# Altium footprint library WR-PHD_Socket Header.PcbLib: 279 footprints (part 18 of 18)
Each footprint in its own frame and in the unit in brackets; x right, y up, seen from the top. Pads: shape width x height; smd on the part's side, far side on the other; paste and mask are expansions set on the pad; w line width, h text height; cw(c..) or ccw(c..) is an arc to the next point about the centre after c.
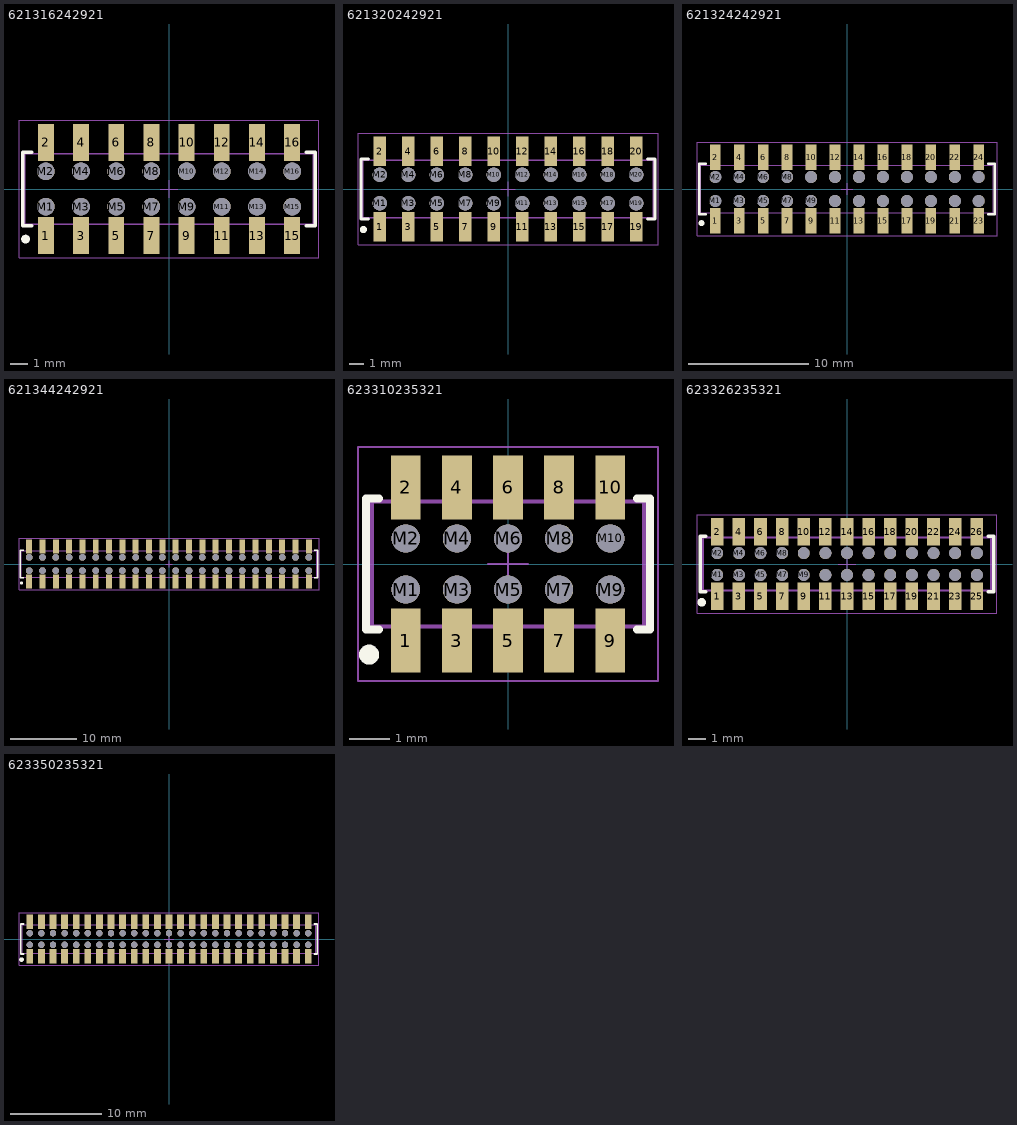
[diagram p17: the footprints below, top view; thin cyan lines are the x and y axes]

## 621316242921 [mm] "Socket Header, Pitch 2.00 mm, SMT, Vertical, dual row, 16p"
height 4.85
pads (32):
  rect 0.9x2.1 smd: 1(-7,-2.65) 2(-7,2.65) 3(-5,-2.65) 4(-5,2.65) 5(-3,-2.65) 6(-3,2.65) 7(-1,-2.65) 8(-1,2.65) 9(1,-2.65) 10(1,2.65) 11(3,-2.65) 12(3,2.65) 13(5,-2.65) 14(5,2.65) 15(7,-2.65) 16(7,2.65)
  round 1 hole 1 unplated: M1(-7,-1) M2(-7,1) M3(-5,-1) M4(-5,1) M5(-3,-1) M6(-3,1) M7(-1,-1) M8(-1,1) M9(1,-1) M10(1,1) M11(3,-1) M12(3,1) M13(5,-1) M14(5,1) M15(7,-1) M16(7,1)
Top Overlay:
  circle w0.25: c-8.15,-2.85 r0.125
  lines w0.2: -7.8,-2.1 -8.325,-2.1 -8.325,2.1 -7.8,2.1 ; 7.8,-2.1 8.325,-2.1 8.325,2.1 7.8,2.1
Top Designator:
  text ".Designator" at -7.498,-0.5 h1.5
Top Component Outline:
  lines w0.1: -7.25,-2 -7.25,-3.1 -6.75,-3.1 -6.75,-2 ; -7.25,2 -7.25,3.1 -6.75,3.1 -6.75,2 ; -5.25,-2 -5.25,-3.1 -4.75,-3.1 -4.75,-2 ; -5.25,2 -5.25,3.1 -4.75,3.1 -4.75,2 ; -3.25,-2 -3.25,-3.1 -2.75,-3.1 -2.75,-2 ; -3.25,2 -3.25,3.1 -2.75,3.1 -2.75,2 ; -1.25,-2 -1.25,-3.1 -0.75,-3.1 -0.75,-2 ; -1.25,2 -1.25,3.1 -0.75,3.1 -0.75,2 ; 0.75,-2 0.75,-3.1 1.25,-3.1 1.25,-2 ; 0.75,2 0.75,3.1 1.25,3.1 1.25,2 ; 2.75,-2 2.75,-3.1 3.25,-3.1 3.25,-2 ; 2.75,2 2.75,3.1 3.25,3.1 3.25,2 ; 4.75,-2 4.75,-3.1 5.25,-3.1 5.25,-2 ; 4.75,2 4.75,3.1 5.25,3.1 5.25,2 ; 6.75,-2 6.75,-3.1 7.25,-3.1 7.25,-2 ; 6.75,2 6.75,3.1 7.25,3.1 7.25,2 ; -8.2,-2 8.2,-2 8.2,2 -8.2,2 -8.2,-2
Top Courtyard:
  lines w0.05: -8.525,-3.9 -8.525,3.9 8.525,3.9 8.525,-3.9 -8.525,-3.9
Top Component Center:
  lines w0.05: -0.5,0 0.5,0 ; 0,-0.5 0,0.5
3D body "621316242921.stp": height 4.6, standoff 0, extent -8.25,-3.1 8.25,3.1

## 621320242921 [mm] "Socket Header, Pitch 2.00 mm, SMT, Vertical, dual row, 20p"
height 4.85
pads (40):
  rect 0.9x2.1 smd: 1(-9,-2.65) 2(-9,2.65) 3(-7,-2.65) 4(-7,2.65) 5(-5,-2.65) 6(-5,2.65) 7(-3,-2.65) 8(-3,2.65) 9(-1,-2.65) 10(-1,2.65) 11(1,-2.65) 12(1,2.65) 13(3,-2.65) 14(3,2.65) 15(5,-2.65) 16(5,2.65) 17(7,-2.65) 18(7,2.65) 19(9,-2.65) 20(9,2.65)
  round 1 hole 1 unplated: M1(-9,-1) M2(-9,1) M3(-7,-1) M4(-7,1) M5(-5,-1) M6(-5,1) M7(-3,-1) M8(-3,1) M9(-1,-1) M10(-1,1) M11(1,-1) M12(1,1) M13(3,-1) M14(3,1) M15(5,-1) M16(5,1) M17(7,-1) M18(7,1) M19(9,-1) M20(9,1)
Top Overlay:
  circle w0.25: c-10.15,-2.85 r0.125
  lines w0.2: -9.8,-2.1 -10.325,-2.1 -10.325,2.1 -9.8,2.1 ; 9.8,-2.1 10.325,-2.1 10.325,2.1 9.8,2.1
Top Designator:
  text ".Designator" at -7.498,-0.5 h1.5
Top Component Outline:
  lines w0.1: -9.25,-2 -9.25,-3.1 -8.75,-3.1 -8.75,-2 ; -9.25,2 -9.25,3.1 -8.75,3.1 -8.75,2 ; -7.25,-2 -7.25,-3.1 -6.75,-3.1 -6.75,-2 ; -7.25,2 -7.25,3.1 -6.75,3.1 -6.75,2 ; -5.25,-2 -5.25,-3.1 -4.75,-3.1 -4.75,-2 ; -5.25,2 -5.25,3.1 -4.75,3.1 -4.75,2 ; -3.25,-2 -3.25,-3.1 -2.75,-3.1 -2.75,-2 ; -3.25,2 -3.25,3.1 -2.75,3.1 -2.75,2 ; -1.25,-2 -1.25,-3.1 -0.75,-3.1 -0.75,-2 ; -1.25,2 -1.25,3.1 -0.75,3.1 -0.75,2 ; 0.75,-2 0.75,-3.1 1.25,-3.1 1.25,-2 ; 0.75,2 0.75,3.1 1.25,3.1 1.25,2 ; 2.75,-2 2.75,-3.1 3.25,-3.1 3.25,-2 ; 2.75,2 2.75,3.1 3.25,3.1 3.25,2 ; 4.75,-2 4.75,-3.1 5.25,-3.1 5.25,-2 ; 4.75,2 4.75,3.1 5.25,3.1 5.25,2 ; 6.75,-2 6.75,-3.1 7.25,-3.1 7.25,-2 ; 6.75,2 6.75,3.1 7.25,3.1 7.25,2 ; 8.75,-2 8.75,-3.1 9.25,-3.1 9.25,-2 ; 8.75,2 8.75,3.1 9.25,3.1 9.25,2 ; -10.2,-2 10.2,-2 10.2,2 -10.2,2 -10.2,-2
Top Courtyard:
  lines w0.05: -10.525,-3.9 -10.525,3.9 10.525,3.9 10.525,-3.9 -10.525,-3.9
Top Component Center:
  lines w0.05: -0.5,0 0.5,0 ; 0,-0.5 0,0.5
3D body "621320242921.stp": height 4.6, standoff 0, extent -10.25,-3.1 10.25,3.1

## 621324242921 [mm] "Socket Header, Pitch 2.00 mm, SMT, Vertical, dual row, 24p"
height 4.85
pads (48):
  rect 0.9x2.1 smd: 1(-11,-2.65) 2(-11,2.65) 3(-9,-2.65) 4(-9,2.65) 5(-7,-2.65) 6(-7,2.65) 7(-5,-2.65) 8(-5,2.65) 9(-3,-2.65) 10(-3,2.65) 11(-1,-2.65) 12(-1,2.65) 13(1,-2.65) 14(1,2.65) 15(3,-2.65) 16(3,2.65) 17(5,-2.65) 18(5,2.65) 19(7,-2.65) 20(7,2.65) 21(9,-2.65) 22(9,2.65) 23(11,-2.65) 24(11,2.65)
  round 1 hole 1 unplated: M1(-11,-1) M2(-11,1) M3(-9,-1) M4(-9,1) M5(-7,-1) M6(-7,1) M7(-5,-1) M8(-5,1) M9(-3,-1) M10(-3,1) M11(-1,-1) M12(-1,1) M13(1,-1) M14(1,1) M15(3,-1) M16(3,1) M17(5,-1) M18(5,1) M19(7,-1) M20(7,1) M21(9,-1) M22(9,1) M23(11,-1) M24(11,1)
Top Overlay:
  circle w0.25: c-12.15,-2.85 r0.125
  lines w0.2: -11.8,-2.1 -12.325,-2.1 -12.325,2.1 -11.8,2.1 ; 11.8,-2.1 12.325,-2.1 12.325,2.1 11.8,2.1
Top Designator:
  text ".Designator" at -7.498,-0.5 h1.5
Top Component Outline:
  lines w0.1: -11.25,-2 -11.25,-3.1 -10.75,-3.1 -10.75,-2 ; -11.25,2 -11.25,3.1 -10.75,3.1 -10.75,2 ; -9.25,-2 -9.25,-3.1 -8.75,-3.1 -8.75,-2 ; -9.25,2 -9.25,3.1 -8.75,3.1 -8.75,2 ; -7.25,-2 -7.25,-3.1 -6.75,-3.1 -6.75,-2 ; -7.25,2 -7.25,3.1 -6.75,3.1 -6.75,2 ; -5.25,-2 -5.25,-3.1 -4.75,-3.1 -4.75,-2 ; -5.25,2 -5.25,3.1 -4.75,3.1 -4.75,2 ; -3.25,-2 -3.25,-3.1 -2.75,-3.1 -2.75,-2 ; -3.25,2 -3.25,3.1 -2.75,3.1 -2.75,2 ; -1.25,-2 -1.25,-3.1 -0.75,-3.1 -0.75,-2 ; -1.25,2 -1.25,3.1 -0.75,3.1 -0.75,2 ; 0.75,-2 0.75,-3.1 1.25,-3.1 1.25,-2 ; 0.75,2 0.75,3.1 1.25,3.1 1.25,2 ; 2.75,-2 2.75,-3.1 3.25,-3.1 3.25,-2 ; 2.75,2 2.75,3.1 3.25,3.1 3.25,2 ; 4.75,-2 4.75,-3.1 5.25,-3.1 5.25,-2 ; 4.75,2 4.75,3.1 5.25,3.1 5.25,2 ; 6.75,-2 6.75,-3.1 7.25,-3.1 7.25,-2 ; 6.75,2 6.75,3.1 7.25,3.1 7.25,2 ; 8.75,-2 8.75,-3.1 9.25,-3.1 9.25,-2 ; 8.75,2 8.75,3.1 9.25,3.1 9.25,2 ; 10.75,-2 10.75,-3.1 11.25,-3.1 11.25,-2 ; 10.75,2 10.75,3.1 11.25,3.1 11.25,2 ; -12.2,-2 12.2,-2 12.2,2 -12.2,2 -12.2,-2
Top Courtyard:
  lines w0.05: -12.525,-3.9 -12.525,3.9 12.525,3.9 12.525,-3.9 -12.525,-3.9
Top Component Center:
  lines w0.05: -0.5,0 0.5,0 ; 0,-0.5 0,0.5
3D body "621324242921.stp": height 4.6, standoff 0, extent -12.25,-3.1 12.25,3.1

## 621344242921 [mm] "Socket Header, Pitch 2.00 mm, SMT, Vertical, dual row, 44p"
height 4.85
pads (88):
  rect 0.9x2.1 smd: 1(-21,-2.65) 2(-21,2.65) 3(-19,-2.65) 4(-19,2.65) 5(-17,-2.65) 6(-17,2.65) 7(-15,-2.65) 8(-15,2.65) 9(-13,-2.65) 10(-13,2.65) 11(-11,-2.65) 12(-11,2.65) 13(-9,-2.65) 14(-9,2.65) 15(-7,-2.65) 16(-7,2.65) 17(-5,-2.65) 18(-5,2.65) 19(-3,-2.65) 20(-3,2.65) 21(-1,-2.65) 22(-1,2.65) 23(1,-2.65) 24(1,2.65) 25(3,-2.65) 26(3,2.65) 27(5,-2.65) 28(5,2.65) 29(7,-2.65) 30(7,2.65) 31(9,-2.65) 32(9,2.65) 33(11,-2.65) 34(11,2.65) 35(13,-2.65) 36(13,2.65) 37(15,-2.65) 38(15,2.65) 39(17,-2.65) 40(17,2.65) 41(19,-2.65) 42(19,2.65) 43(21,-2.65) 44(21,2.65)
  round 1 hole 1 unplated: M1(-21,-1) M2(-21,1) M3(-19,-1) M4(-19,1) M5(-17,-1) M6(-17,1) M7(-15,-1) M8(-15,1) M9(-13,-1) M10(-13,1) M11(-11,-1) M12(-11,1) M13(-9,-1) M14(-9,1) M15(-7,-1) M16(-7,1) M17(-5,-1) M18(-5,1) M19(-3,-1) M20(-3,1) M21(-1,-1) M22(-1,1) M23(1,-1) M24(1,1) M25(3,-1) M26(3,1) M27(5,-1) M28(5,1) M29(7,-1) M30(7,1) M31(9,-1) M32(9,1) M33(11,-1) M34(11,1) M35(13,-1) M36(13,1) M37(15,-1) M38(15,1) M39(17,-1) M40(17,1) M41(19,-1) M42(19,1) M43(21,-1) M44(21,1)
Top Overlay:
  circle w0.25: c-22.15,-2.85 r0.125
  lines w0.2: -21.8,-2.1 -22.325,-2.1 -22.325,2.1 -21.8,2.1 ; 21.8,-2.1 22.325,-2.1 22.325,2.1 21.8,2.1
Top Designator:
  text ".Designator" at -7.498,-0.5 h1.5
Top Component Outline:
  lines w0.1: -21.25,-2 -21.25,-3.1 -20.75,-3.1 -20.75,-2 ; -21.25,2 -21.25,3.1 -20.75,3.1 -20.75,2 ; -19.25,-2 -19.25,-3.1 -18.75,-3.1 -18.75,-2 ; -19.25,2 -19.25,3.1 -18.75,3.1 -18.75,2 ; -17.25,-2 -17.25,-3.1 -16.75,-3.1 -16.75,-2 ; -17.25,2 -17.25,3.1 -16.75,3.1 -16.75,2 ; -15.25,-2 -15.25,-3.1 -14.75,-3.1 -14.75,-2 ; -15.25,2 -15.25,3.1 -14.75,3.1 -14.75,2 ; -13.25,-2 -13.25,-3.1 -12.75,-3.1 -12.75,-2 ; -13.25,2 -13.25,3.1 -12.75,3.1 -12.75,2 ; -11.25,-2 -11.25,-3.1 -10.75,-3.1 -10.75,-2 ; -11.25,2 -11.25,3.1 -10.75,3.1 -10.75,2 ; -9.25,-2 -9.25,-3.1 -8.75,-3.1 -8.75,-2 ; -9.25,2 -9.25,3.1 -8.75,3.1 -8.75,2 ; -7.25,-2 -7.25,-3.1 -6.75,-3.1 -6.75,-2 ; -7.25,2 -7.25,3.1 -6.75,3.1 -6.75,2 ; -5.25,-2 -5.25,-3.1 -4.75,-3.1 -4.75,-2 ; -5.25,2 -5.25,3.1 -4.75,3.1 -4.75,2 ; -3.25,-2 -3.25,-3.1 -2.75,-3.1 -2.75,-2 ; -3.25,2 -3.25,3.1 -2.75,3.1 -2.75,2 ; -1.25,-2 -1.25,-3.1 -0.75,-3.1 -0.75,-2 ; -1.25,2 -1.25,3.1 -0.75,3.1 -0.75,2 ; 0.75,-2 0.75,-3.1 1.25,-3.1 1.25,-2 ; 0.75,2 0.75,3.1 1.25,3.1 1.25,2 ; 2.75,-2 2.75,-3.1 3.25,-3.1 3.25,-2 ; 2.75,2 2.75,3.1 3.25,3.1 3.25,2 ; 4.75,-2 4.75,-3.1 5.25,-3.1 5.25,-2 ; 4.75,2 4.75,3.1 5.25,3.1 5.25,2 ; 6.75,-2 6.75,-3.1 7.25,-3.1 7.25,-2 ; 6.75,2 6.75,3.1 7.25,3.1 7.25,2 ; 8.75,-2 8.75,-3.1 9.25,-3.1 9.25,-2 ; 8.75,2 8.75,3.1 9.25,3.1 9.25,2 ; 10.75,-2 10.75,-3.1 11.25,-3.1 11.25,-2 ; 10.75,2 10.75,3.1 11.25,3.1 11.25,2 ; 12.75,-2 12.75,-3.1 13.25,-3.1 13.25,-2 ; 12.75,2 12.75,3.1 13.25,3.1 13.25,2 ; 14.75,-2 14.75,-3.1 15.25,-3.1 15.25,-2 ; 14.75,2 14.75,3.1 15.25,3.1 15.25,2 ; 16.75,-2 16.75,-3.1 17.25,-3.1 17.25,-2 ; 16.75,2 16.75,3.1 17.25,3.1 17.25,2 ; 18.75,-2 18.75,-3.1 19.25,-3.1 19.25,-2 ; 18.75,2 18.75,3.1 19.25,3.1 19.25,2 ; 20.75,-2 20.75,-3.1 21.25,-3.1 21.25,-2 ; 20.75,2 20.75,3.1 21.25,3.1 21.25,2 ; -22.2,-2 -22.2,2 22.2,2 22.2,-2 -22.2,-2
Top Courtyard:
  lines w0.05: -22.525,-3.9 22.525,-3.9 22.525,3.9 -22.525,3.9 -22.525,-3.9
Top Component Center:
  lines w0.05: -0.5,0 0.5,0 ; 0,-0.5 0,0.5
3D body "621344242921.stp": height 4.6, standoff 0, extent -22.25,-3.1 22.25,3.1

## 623310235321 [mm] "Socket Header, Pitch 1.27 mm, SMT, Vertical, dual row, 10p"
height 2.35
pads (20):
  rect 0.74x1.6 smd: 1(-2.54,-1.9) 2(-2.54,1.9) 3(-1.27,-1.9) 4(-1.27,1.9) 5(0,-1.9) 6(0,1.9) 7(1.27,-1.9) 8(1.27,1.9) 9(2.54,-1.9) 10(2.54,1.9)
  round 0.7 hole 0.7 unplated: M1(-2.54,-0.635) M2(-2.54,0.635) M3(-1.27,-0.635) M4(-1.27,0.635) M5(0,-0.635) M6(0,0.635) M7(1.27,-0.635) M8(1.27,0.635) M9(2.54,-0.635) M10(2.54,0.635)
Top Overlay:
  circle w0.25: c-3.45,-2.25 r0.125
  lines w0.2: -3.2,-1.625 -3.525,-1.625 -3.525,1.625 -3.2,1.625 ; 3.2,-1.625 3.525,-1.625 3.525,1.625 3.2,1.625
Top Designator:
  text ".Designator" at -7.498,-0.5 h1.5
Top Component Outline:
  lines w0.1: -2.74,-1.55 -2.74,-2.2 -2.34,-2.2 -2.34,-1.55 ; -2.74,1.55 -2.74,2.2 -2.34,2.2 -2.34,1.55 ; -1.47,-1.55 -1.47,-2.2 -1.07,-2.2 -1.07,-1.55 ; -1.47,1.55 -1.47,2.2 -1.07,2.2 -1.07,1.55 ; -0.2,-1.55 -0.2,-2.2 0.2,-2.2 0.2,-1.55 ; -0.2,1.55 -0.2,2.2 0.2,2.2 0.2,1.55 ; 1.07,-1.55 1.07,-2.2 1.47,-2.2 1.47,-1.55 ; 1.07,1.55 1.07,2.2 1.47,2.2 1.47,1.55 ; 2.34,-1.55 2.34,-2.2 2.74,-2.2 2.74,-1.55 ; 2.34,1.55 2.34,2.2 2.74,2.2 2.74,1.55 ; -3.375,-1.55 3.375,-1.55 3.375,1.55 -3.375,1.55 -3.375,-1.55
Top Courtyard:
  lines w0.05: -3.725,-2.9 3.725,-2.9 3.725,2.9 -3.725,2.9 -3.725,-2.9
Top Component Center:
  lines w0.05: -0.5,0 0.5,0 ; 0,-0.5 0,0.5
3D body "623310235321.stp": height 2.25, standoff 0, extent -3.375,-2.2 3.375,2.2

## 623326235321 [mm] "Socket Header, Pitch 1.27 mm, SMT, Vertical, dual row, 26p"
height 2.35
pads (52):
  rect 0.74x1.6 smd: 1(-7.62,-1.9) 2(-7.62,1.9) 3(-6.35,-1.9) 4(-6.35,1.9) 5(-5.08,-1.9) 6(-5.08,1.9) 7(-3.81,-1.9) 8(-3.81,1.9) 9(-2.54,-1.9) 10(-2.54,1.9) 11(-1.27,-1.9) 12(-1.27,1.9) 13(0,-1.9) 14(0,1.9) 15(1.27,-1.9) 16(1.27,1.9) 17(2.54,-1.9) 18(2.54,1.9) 19(3.81,-1.9) 20(3.81,1.9) 21(5.08,-1.9) 22(5.08,1.9) 23(6.35,-1.9) 24(6.35,1.9) 25(7.62,-1.9) 26(7.62,1.9)
  round 0.7 hole 0.7 unplated: M1(-7.62,-0.635) M2(-7.62,0.635) M3(-6.35,-0.635) M4(-6.35,0.635) M5(-5.08,-0.635) M6(-5.08,0.635) M7(-3.81,-0.635) M8(-3.81,0.635) M9(-2.54,-0.635) M10(-2.54,0.635) M11(-1.27,-0.635) M12(-1.27,0.635) M13(0,-0.635) M14(0,0.635) M15(1.27,-0.635) M16(1.27,0.635) M17(2.54,-0.635) M18(2.54,0.635) M19(3.81,-0.635) M20(3.81,0.635) M21(5.08,-0.635) M22(5.08,0.635) M23(6.35,-0.635) M24(6.35,0.635) M25(7.62,-0.635) M26(7.62,0.635)
Top Overlay:
  circle w0.25: c-8.53,-2.25 r0.125
  lines w0.2: -8.28,-1.625 -8.605,-1.625 -8.605,1.625 -8.28,1.625 ; 8.28,-1.625 8.605,-1.625 8.605,1.625 8.28,1.625
Top Designator:
  text ".Designator" at -7.498,-0.5 h1.5
Top Component Outline:
  lines w0.1: -7.82,-1.55 -7.82,-2.2 -7.42,-2.2 -7.42,-1.55 ; -7.82,1.55 -7.82,2.2 -7.42,2.2 -7.42,1.55 ; -6.55,-1.55 -6.55,-2.2 -6.15,-2.2 -6.15,-1.55 ; -6.55,1.55 -6.55,2.2 -6.15,2.2 -6.15,1.55 ; -5.28,-1.55 -5.28,-2.2 -4.88,-2.2 -4.88,-1.55 ; -5.28,1.55 -5.28,2.2 -4.88,2.2 -4.88,1.55 ; -4.01,-1.55 -4.01,-2.2 -3.61,-2.2 -3.61,-1.55 ; -4.01,1.55 -4.01,2.2 -3.61,2.2 -3.61,1.55 ; -2.74,-1.55 -2.74,-2.2 -2.34,-2.2 -2.34,-1.55 ; -2.74,1.55 -2.74,2.2 -2.34,2.2 -2.34,1.55 ; -1.47,-1.55 -1.47,-2.2 -1.07,-2.2 -1.07,-1.55 ; -1.47,1.55 -1.47,2.2 -1.07,2.2 -1.07,1.55 ; -0.2,-1.55 -0.2,-2.2 0.2,-2.2 0.2,-1.55 ; -0.2,1.55 -0.2,2.2 0.2,2.2 0.2,1.55 ; 1.07,-1.55 1.07,-2.2 1.47,-2.2 1.47,-1.55 ; 1.07,1.55 1.07,2.2 1.47,2.2 1.47,1.55 ; 2.34,-1.55 2.34,-2.2 2.74,-2.2 2.74,-1.55 ; 2.34,1.55 2.34,2.2 2.74,2.2 2.74,1.55 ; 3.61,-1.55 3.61,-2.2 4.01,-2.2 4.01,-1.55 ; 3.61,1.55 3.61,2.2 4.01,2.2 4.01,1.55 ; 4.88,-1.55 4.88,-2.2 5.28,-2.2 5.28,-1.55 ; 4.88,1.55 4.88,2.2 5.28,2.2 5.28,1.55 ; 6.15,-1.55 6.15,-2.2 6.55,-2.2 6.55,-1.55 ; 6.15,1.55 6.15,2.2 6.55,2.2 6.55,1.55 ; 7.42,-1.55 7.42,-2.2 7.82,-2.2 7.82,-1.55 ; 7.42,1.55 7.42,2.2 7.82,2.2 7.82,1.55 ; -8.455,-1.55 -8.455,1.55 8.455,1.55 8.455,-1.55 -8.455,-1.55
Top Courtyard:
  lines w0.05: -8.805,-2.9 8.805,-2.9 8.805,2.9 -8.805,2.9 -8.805,-2.9
Top Component Center:
  lines w0.05: -0.5,0 0.5,0 ; 0,-0.5 0,0.5
3D body "623326235321.stp": height 2.25, standoff 0, extent -8.455,-2.2 8.455,2.2

## 623350235321 [mm] "Socket Header, Pitch 1.27 mm, SMT, Vertical, dual row, 50p"
height 2.35
pads (100):
  rect 0.74x1.6 smd: 1(-15.24,-1.9) 2(-15.24,1.9) 3(-13.97,-1.9) 4(-13.97,1.9) 5(-12.7,-1.9) 6(-12.7,1.9) 7(-11.43,-1.9) 8(-11.43,1.9) 9(-10.16,-1.9) 10(-10.16,1.9) 11(-8.89,-1.9) 12(-8.89,1.9) 13(-7.62,-1.9) 14(-7.62,1.9) 15(-6.35,-1.9) 16(-6.35,1.9) 17(-5.08,-1.9) 18(-5.08,1.9) 19(-3.81,-1.9) 20(-3.81,1.9) 21(-2.54,-1.9) 22(-2.54,1.9) 23(-1.27,-1.9) 24(-1.27,1.9) 25(0,-1.9) 26(0,1.9) 27(1.27,-1.9) 28(1.27,1.9) 29(2.54,-1.9) 30(2.54,1.9) 31(3.81,-1.9) 32(3.81,1.9) 33(5.08,-1.9) 34(5.08,1.9) 35(6.35,-1.9) 36(6.35,1.9) 37(7.62,-1.9) 38(7.62,1.9) 39(8.89,-1.9) 40(8.89,1.9) 41(10.16,-1.9) 42(10.16,1.9) 43(11.43,-1.9) 44(11.43,1.9) 45(12.7,-1.9) 46(12.7,1.9) 47(13.97,-1.9) 48(13.97,1.9) 49(15.24,-1.9) 50(15.24,1.9)
  round 0.7 hole 0.7 unplated: M1(-15.24,-0.635) M2(-15.24,0.635) M3(-13.97,-0.635) M4(-13.97,0.635) M5(-12.7,-0.635) M6(-12.7,0.635) M7(-11.43,-0.635) M8(-11.43,0.635) M9(-10.16,-0.635) M10(-10.16,0.635) M11(-8.89,-0.635) M12(-8.89,0.635) M13(-7.62,-0.635) M14(-7.62,0.635) M15(-6.35,-0.635) M16(-6.35,0.635) M17(-5.08,-0.635) M18(-5.08,0.635) M19(-3.81,-0.635) M20(-3.81,0.635) M21(-2.54,-0.635) M22(-2.54,0.635) M23(-1.27,-0.635) M24(-1.27,0.635) M25(0,-0.635) M26(0,0.635) M27(1.27,-0.635) M28(1.27,0.635) M29(2.54,-0.635) M30(2.54,0.635) M31(3.81,-0.635) M32(3.81,0.635) M33(5.08,-0.635) M34(5.08,0.635) M35(6.35,-0.635) M36(6.35,0.635) M37(7.62,-0.635) M38(7.62,0.635) M39(8.89,-0.635) M40(8.89,0.635) M41(10.16,-0.635) M42(10.16,0.635) M43(11.43,-0.635) M44(11.43,0.635) M45(12.7,-0.635) M46(12.7,0.635) M47(13.97,-0.635) M48(13.97,0.635) M49(15.24,-0.635) M50(15.24,0.635)
Top Overlay:
  circle w0.25: c-16.15,-2.25 r0.125
  lines w0.2: -15.9,-1.625 -16.225,-1.625 -16.225,1.625 -15.9,1.625 ; 15.9,-1.625 16.225,-1.625 16.225,1.625 15.9,1.625
Top Designator:
  text ".Designator" at -7.498,-0.5 h1.5
Top Component Outline:
  drawing of 154 lines, arcs and shapes, not listed
Top Courtyard:
  lines w0.05: -16.425,-2.9 16.425,-2.9 16.425,2.9 -16.425,2.9 -16.425,-2.9
Top Component Center:
  lines w0.05: -0.5,0 0.5,0 ; 0,-0.5 0,0.5
3D body "623350235321.stp": height 2.25, standoff 0, extent -16.075,-2.2 16.075,2.2